# Altium footprint library 2020-05-05_05-37-53.PcbLib: 1 footprints
Each footprint in its own frame and in the unit in brackets; x right, y up, seen from the top. Pads: shape width x height; smd on the part's side, far side on the other; paste and mask are expansions set on the pad; w line width, h text height; cw(c..) or ccw(c..) is an arc to the next point about the centre after c.
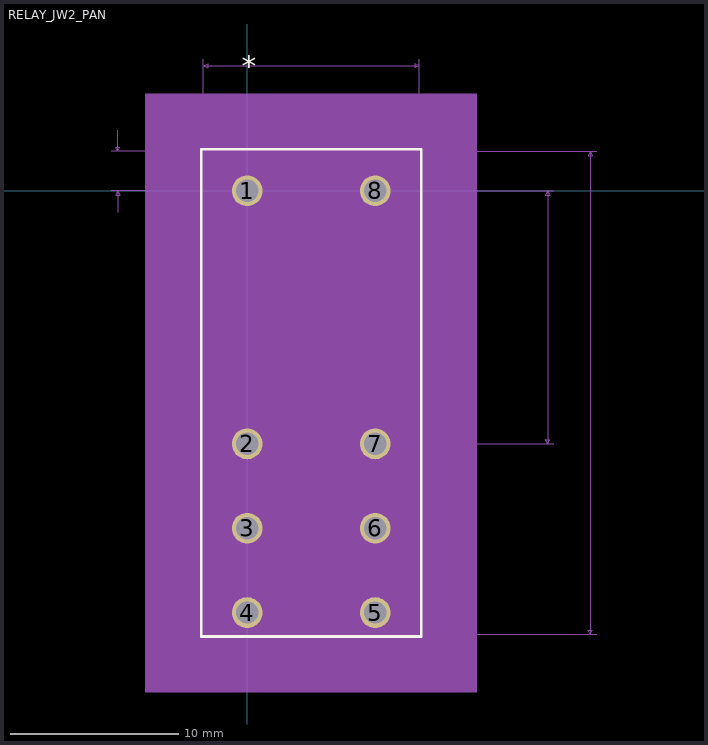
[diagram p0: the footprint, top view; thin cyan lines are the x and y axes]

## RELAY_JW2_PAN [mil]
pads (8):
  round 72 hole 52 mask+0: 1(0,0) 2(0,-591) 3(0,-788) 4(0,-985) 5(299,-985) 6(299,-788) 7(299,-591) 8(299,0)
Top Overlay:
  lines w6: -107.5,-1041 406.5,-1041 406.5,97 -107.5,97 -107.5,-1041
  text "*" at -12.5,265.33 h50
Mechanical 5:
  region: 536.5,-1171 -237.5,-1171 -237.5,227 536.5,227
Mechanical 7:
  lines w1: -317.5,0 401.5,0 ; -317.5,92 149.5,92 816.5,92 ; -302.5,-50 -302.5,0 ; -302.5,142 -302.5,92 ; -102.5,-472 -102.5,307 ; 0,-472 0,207 ; 149.5,0 716.5,0 ; 299,-472 299,207 ; 401.5,-1036 816.5,-1036 ; 401.5,-591 716.5,-591 ; 401.5,-472 401.5,307 ; -302.5,0 -307.5,-10 -297.5,-10 -302.5,0 ; -302.5,92 -307.5,102 -297.5,102 -302.5,92 ; -102.5,292 401.5,292 ; -102.5,292 -92.5,297 -92.5,287 -102.5,292 ; 0,192 299,192 ; 0,192 10,197 10,187 0,192 ; 299,192 289,197 289,187 299,192 ; 401.5,292 391.5,297 391.5,287 401.5,292 ; 701.5,-591 701.5,0 ; 701.5,-591 696.5,-581 706.5,-581 701.5,-591 ; 701.5,0 696.5,-10 706.5,-10 701.5,0 ; 801.5,-1036 801.5,92 ; 801.5,-1036 796.5,-1026 806.5,-1026 801.5,-1036 ; 801.5,92 796.5,82 806.5,82 801.5,92
  text "Default Padstyle: EX72Y72D52P" at -213,-1236 h50
  text "Alt 1 Padstyle: OX60Y90D30P" at -188,-1296 h50
  text "Alt 2 Padstyle: OX90Y60D30P" at -188,-1356 h50
  text "0.504in/12.802mm" at 49.5,312 h25
  text "0.299in/7.595mm" at 55.75,212 h25
  text "0.092in/2.337mm" at -510,33.5 h25
  text "0.591in/15.011mm" at 721.5,-308 h25
  text "1.128in/28.651mm" at 821.5,-484.5 h25
Mechanical 13:
  circle w0: c36,0 r0
  lines w0: 137.5,92 ccw(c149.5,92) 161.5,92
  lines w1: -102.5,-1036 401.5,-1036 401.5,92 -102.5,92 -102.5,-1036
  text "*" at -12.5,81.33 h50
Mechanical 15:
  region: 411.5,-1046 -112.5,-1046 -112.5,102 411.5,102
  region: 401.5,-1036 -102.5,-1036 -102.5,92 401.5,92
  lines w6: -112.5,-1046 -112.5,102 411.5,102 411.5,-1046 -112.5,-1046
3D body: height 10, standoff 0, extent 0,0 10,10